# Altium schematic symbol library Robert_.SchLib: 177 symbols (part 5 of 6)
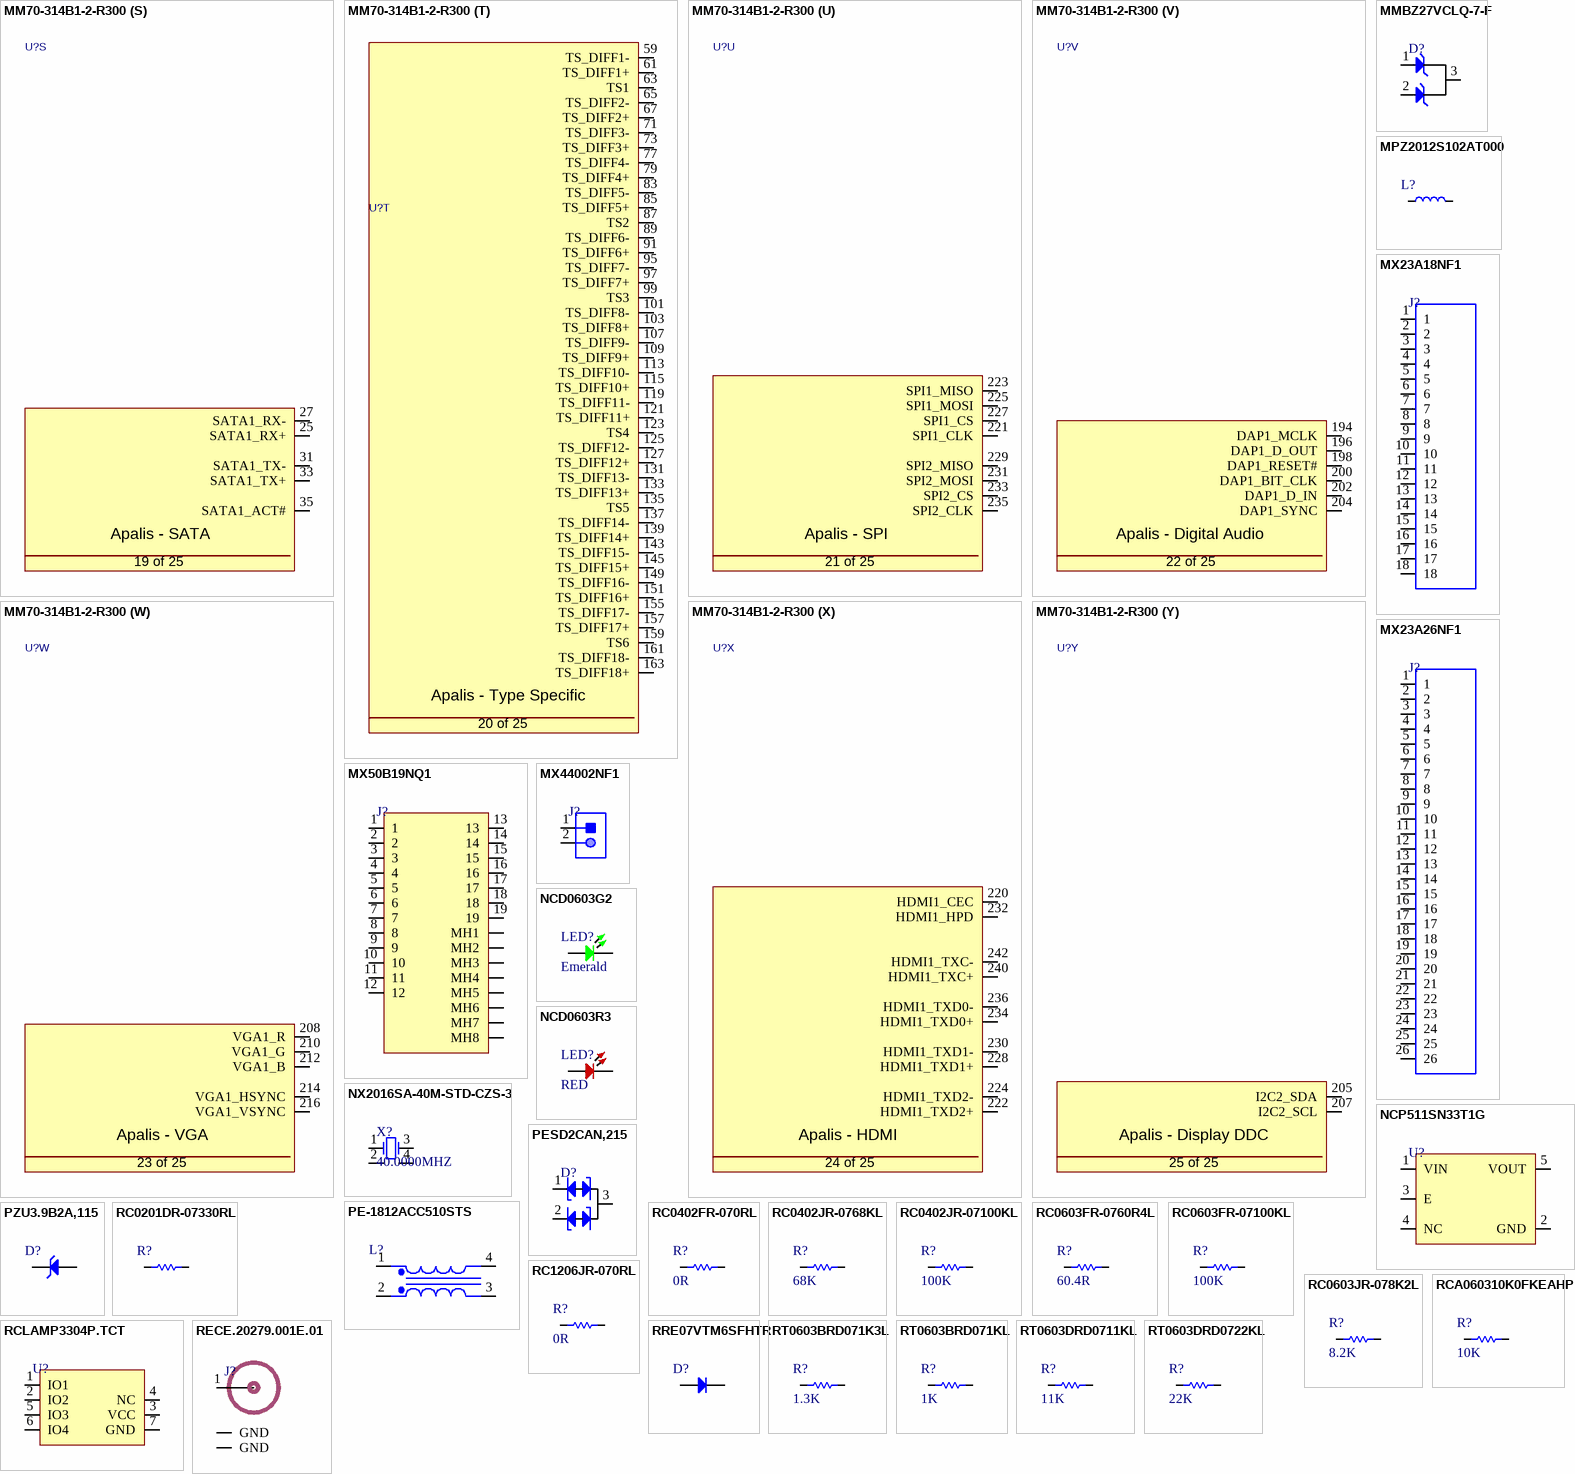
[diagram p10: symbols MM70-314B1-2-R300 to RT0603DRD0722KL]

## RC0402JR-0768KL
designator R?, comment 68K
RES 68K OHM 5% 1/16W 0402; Manufacturer: Yageo; Manufacturer Part Number: RC0402JR-0768KL; Supplier: Future Electronics; Supplier Part Number: 7241375; RoHS: Yes; Category: Chip SMD Resistors; Stock: 120000; Pricing: 10000=0.0008, 100000=0.0008, 400000=0.0008, 1250000=0.0007, 4000000=0.0007 (USD); ComponentLink1URL: https://datasheet.ciiva.com/7850/1018594-7850238.pdf?src-supplier=Element14; ComponentLink1Description: https://datasheet.ciiva.com/7850/1018594-7850238.pdf?src-supplier=Element14; ComponentLink2URL: https://datasheet.ciiva.com/7850/1018594-7850239.pdf?src-supplier=Element14; ComponentLink2Description: https://datasheet.ciiva.com/7850/1018594-7850239.pdf?src-supplier=Element14; ComponentLink3URL: https://datasheet.ciiva.com/7983/1018594-7983608.pdf?src-supplier=Element14; ComponentLink3Description: https://datasheet.ciiva.com/7983/1018594-7983608.pdf?src-supplier=Element14; ComponentLink4URL: https://datasheet.ciiva.com/2518/pyu-r-int-thick-7-2518898.pdf?src-supplier=Digi-Key; ComponentLink4Description: https://datasheet.ciiva.com/2518/pyu-r-int-thick-7-2518898.pdf?src-supplier=Digi-Key; ComponentLink5URL: https://datasheet.ciiva.com/2518/pyu-r-int-thick-7-2518899.pdf?src-supplier=Digi-Key; ComponentLink5Description: https://datasheet.ciiva.com/2518/pyu-r-int-thick-7-2518899.pdf?src-supplier=Digi-Key; ComponentLink6URL: https://datasheet.ciiva.com/2518/pyu-r-int-thick-7-2518900.pdf?src-supplier=Digi-Key; ComponentLink6Description: https://datasheet.ciiva.com/2518/pyu-r-int-thick-7-2518900.pdf?src-supplier=Digi-Key; ComponentLink7URL: https://datasheet.ciiva.com/6067/1018594-6067879.pdf?src-supplier=Farnell; ComponentLink7Description: https://datasheet.ciiva.com/6067/1018594-6067879.pdf?src-supplier=Farnell
footprint Res-0402
pins: 1, 2

## RC0402JR-07100KL
designator R?, comment 100K
RES 100K OHM 5% 1/16W 0402; Manufacturer: Yageo; Manufacturer Part Number: RC0402JR-07100KL; Voltage Rating: 50V; Value: 100kR; Power Rating: 62.5mW; Temperature Coefficient: 100ppm/°C; Max Power Dissipation: 63mW; Supplier: Future Electronics; Supplier Part Number: 4246625; RoHS: Yes; Category: Chip SMD Resistors; Stock: 7540000; Pricing: 10000=0.0013, 100000=0.0008, 200000=0.0013, 400000=0.0008, 750000=0.0012, 1250000=0.0007, 2500000=0.0012, 4000000=0.0007, 10000000=0.0011 (USD); Case/Package: 0402; Case Code (Metric): 1005; Case Code (Imperial): 0402; Min Operating Temperature: -55°C; Max Operating Temperature: 155°C; Packaging: Tape and Reel; Termination: SMD/SMT; Tolerance: 5%; Series: RC; Resistor Type: Thick Film; Number of Terminations: 2; Features: Moisture Resistant; Resistance Tolerance: 5%; Construction: Rectangular; Length: 1mm; Depth: 0.5mm; Lead Free: Lead Free; Reach SVHC Compliant: Unknown; RoHS Compliant: Yes; Military Standard: Not; ComponentLink1URL: https://datasheet.ciiva.com/2491/pyu-r-int-thick-7-2491208.pdf?src-supplier=Digi-Key; ComponentLink1Description: https://datasheet.ciiva.com/2491/pyu-r-int-thick-7-2491208.pdf?src-supplier=Digi-Key; ComponentLink2URL: https://datasheet.ciiva.com/46394/1018594-46394941.pdf?src-supplier=Element14; ComponentLink2Description: https://datasheet.ciiva.com/46394/1018594-46394941.pdf?src-supplier=Element14; ComponentLink3URL: https://datasheet.ciiva.com/2491/pyu-r-int-thick-7-2491209.pdf?src-supplier=Digi-Key; ComponentLink3Description: https://datasheet.ciiva.com/2491/pyu-r-int-thick-7-2491209.pdf?src-supplier=Digi-Key; ComponentLink4URL: https://datasheet.ciiva.com/2491/pyu-r-int-thick-7-2491207.pdf?src-supplier=Digi-Key; ComponentLink4Description: https://datasheet.ciiva.com/2491/pyu-r-int-thick-7-2491207.pdf?src-supplier=Digi-Key; ComponentLink5URL: https://datasheet.ciiva.com/12668/pyu-rc0402-51-rohs-l-6-r-12668218.pdf?src-supplier=Mouser; ComponentLink5Description: https://datasheet.ciiva.com/12668/pyu-rc0402-51-rohs-l-6-r-12668218.pdf?src-supplier=Mouser
footprint Res-0402
pins: 1, 2

## RC0603FR-0760R4L
designator R?, comment 60.4R
RES 60.4 OHM 1% 1/10W 0603; Manufacturer: Yageo; Manufacturer Part Number: RC0603FR-0760R4L; Supplier: Rs; Supplier Part Number: 2424164; RoHS: Yes; Category: Chip SMD Resistors; Stock: 8600; Pricing: 100=0.008, 1000=0.007, 2000=0.006 (GBP); ComponentLink1URL: https://datasheet.ciiva.com/12558/rc0603-272842-12558933.pdf?src-supplier=Mouser; ComponentLink1Description: https://datasheet.ciiva.com/12558/rc0603-272842-12558933.pdf?src-supplier=Mouser
footprint Res-0603
pins: 1, 2

## RC0603FR-07100KL
designator R?, comment 100K
RES 100K OHM 1% 1/10W 0603; Manufacturer: Yageo; Manufacturer Part Number: RC0603FR-07100KL; Value: 100kR; Temperature Coefficient: 100ppm/°C; Voltage Rating (DC): 50V; Power Rating: 100mW; Supplier: Future Electronics; Supplier Part Number: 3697448; RoHS: Yes; Category: Chip SMD Resistors; Stock: 11175000; Pricing: 5000=0.0013, 50000=0.0012, 75000=0.0014, 200000=0.0011, 250000=0.0014, 625000=0.0011, 750000=0.0013, 2000000=0.001, 2500000=0.0012 (USD); Case/Package: 0603; Pins: 2; Case Code (Imperial): 0603; Case Code (Metric): 1608; Min Operating Temperature: -55°C; Max Operating Temperature: 155°C; Tolerance: 1%; Resistor Type: Thick Film; Packaging: Tape and Reel; Voltage Rating: 50V; Termination: SMD/SMT; Number of Terminations: 2; Features: Moisture Resistant; Series: RC; Max Power Dissipation: 100mW; Resistance Tolerance: 1%; Construction: Rectangular; Technology: THICK FILM; Length: 1.6mm; Width: 0.8mm; Height: 0.45mm; Depth: 0.8mm; Reach SVHC Compliant: No; Lead Free: Lead Free; Military Standard: Not; RoHS Compliant: Yes
footprint Res-0603
pins: 1, 2

## RC0603JR-078K2L
designator R?, comment 8.2K
RES 8.2K OHM 5% 1/10W 0603; Manufacturer: Yageo; Manufacturer Part Number: RC0603JR-078K2L; Supplier: Future Electronics; Supplier Part Number: 5790217; RoHS: Yes; Category: Chip SMD Resistors; Stock: 755000; Pricing: 5000=0.0015, 75000=0.0015, 250000=0.0014, 750000=0.0013, 2500000=0.0012 (USD); ComponentLink1URL: https://datasheet.ciiva.com/7746/443971-7746543.pdf?src-supplier=Element14; ComponentLink1Description: https://datasheet.ciiva.com/7746/443971-7746543.pdf?src-supplier=Element14; ComponentLink2URL: https://datasheet.ciiva.com/2452/pyu-r-int-thick-7-2452914.pdf?src-supplier=Digi-Key; ComponentLink2Description: https://datasheet.ciiva.com/2452/pyu-r-int-thick-7-2452914.pdf?src-supplier=Digi-Key; ComponentLink3URL: https://datasheet.ciiva.com/2452/pyu-r-int-thick-7-2452915.pdf?src-supplier=Digi-Key; ComponentLink3Description: https://datasheet.ciiva.com/2452/pyu-r-int-thick-7-2452915.pdf?src-supplier=Digi-Key; ComponentLink4URL: https://datasheet.ciiva.com/2452/pyu-r-int-thick-7-2452916.pdf?src-supplier=Digi-Key; ComponentLink4Description: https://datasheet.ciiva.com/2452/pyu-r-int-thick-7-2452916.pdf?src-supplier=Digi-Key
footprint Res-0603
pins: 1, 2

## RC1206JR-070RL
designator R?, comment 0R
RES 0 OHM JUMPER 1/4W 1206; Manufacturer: Yageo; Manufacturer Part Number: RC1206JR-070RL; Value: 0mR; Tolerance: 5%; Power Rating: 250mW; Voltage Rating: 200V; Temperature Coefficient: 200ppm/°C; Supplier: Future Electronics; Supplier Part Number: 1070203; RoHS: Yes; Category: Chip SMD Resistors; Stock: 615000; Pricing: 5000=0.0047, 25000=0.0045, 100000=0.0042, 250000=0.0041, 625000=0.0038 (USD); Case/Package: 1206; Contact Plating: Tin,Matte; Case Code (Metric): 3216; Case Code (Imperial): 1206; Min Operating Temperature: -55°C; Max Operating Temperature: 155°C; Resistor Type: Thick Film,Carbon Film; Packaging: Tape and Reel; Package Quantity: 1; Number of Terminations: 2; Termination: SMD/SMT; Max Power Dissipation: 250mW; Series: RC; Resistance Tolerance: 5%; Technology: THICK FILM; Features: Moisture Resistant; Voltage Rating (AC): 200V; Length: 0.122inch; Width: 0.063inch; Height: 0.026inch; Depth: 1.6mm; Lead Free: Lead Free; RoHS Compliant: Yes; Reach SVHC Compliant: Unknown; ComponentLink1URL: https://datasheet.ciiva.com/11808/0900766b80c6630a-11808156.pdf?src-supplier=Rs; ComponentLink1Description: https://datasheet.ciiva.com/11808/0900766b80c6630a-11808156.pdf?src-supplier=Rs; ComponentLink2URL: https://datasheet.ciiva.com/29181/402222-da-01-en-smd-widerstand-0-ohm-1206-29181568.pdf?src-supplier=Conrad; ComponentLink2Description: https://datasheet.ciiva.com/29181/402222-da-01-en-smd-widerstand-0-ohm-1206-29181568.pdf?src-supplier=Conrad; ComponentLink3URL: https://datasheet.ciiva.com/7983/444357-7983807.pdf?src-supplier=Element14; ComponentLink3Description: https://datasheet.ciiva.com/7983/444357-7983807.pdf?src-supplier=Element14; ComponentLink4URL: https://datasheet.ciiva.com/22747/1692832-22747541.pdf?src-supplier=Element14; ComponentLink4Description: https://datasheet.ciiva.com/22747/1692832-22747541.pdf?src-supplier=Element14; ComponentLink5URL: https://datasheet.ciiva.com/46445/444357-46445719.pdf?src-supplier=Element14; ComponentLink5Description: https://datasheet.ciiva.com/46445/444357-46445719.pdf?src-supplier=Element14; ComponentLink6URL: https://datasheet.ciiva.com/2458/pyu-rc1206-51-rohs-l-4-2458669.pdf?src-supplier=Digi-Key; ComponentLink6Description: https://datasheet.ciiva.com/2458/pyu-rc1206-51-rohs-l-4-2458669.pdf?src-supplier=Digi-Key; ComponentLink7URL: https://datasheet.ciiva.com/2458/pyu-rc1206-51-rohs-l-4-2458670.pdf?src-supplier=Digi-Key; ComponentLink7Description: https://datasheet.ciiva.com/2458/pyu-rc1206-51-rohs-l-4-2458670.pdf?src-supplier=Digi-Key; ComponentLink8URL: https://datasheet.ciiva.com/2458/pyu-rc1206-51-rohs-l-4-2458668.pdf?src-supplier=Digi-Key; ComponentLink8Description: https://datasheet.ciiva.com/2458/pyu-rc1206-51-rohs-l-4-2458668.pdf?src-supplier=Digi-Key; ComponentLink9URL: https://datasheet.ciiva.com/7857/1692832-7857422.pdf?src-supplier=Element14; ComponentLink9Description: https://datasheet.ciiva.com/7857/1692832-7857422.pdf?src-supplier=Element14; ComponentLink10URL: https://datasheet.ciiva.com/7857/1692832-7857421.pdf?src-supplier=Element14; ComponentLink10Description: https://datasheet.ciiva.com/7857/1692832-7857421.pdf?src-supplier=Element14; ComponentLink11URL: https://datasheet.ciiva.com/17035/pyu-rc1206-51-rohs-l-4-17035512.pdf?src-supplier=Future+Electronics; ComponentLink11Description: https://datasheet.ciiva.com/17035/pyu-rc1206-51-rohs-l-4-17035512.pdf?src-supplier=Future+Electronics
footprint Res-1206
pins: 1, 2

## RCA060310K0FKEAHP
designator R?, comment 10K
RES SMD 10K OHM 1% 1/10W 0603; Manufacturer: Vishay Dale; Manufacturer Part Number: RCA060310K0FKEAHP; Value: 10kR; Max Power Dissipation: 250mW; Temperature Coefficient: 100ppm/°C; Supplier: Future Electronics; Supplier Part Number: 4171415; RoHS: Yes; Category: Chip SMD Resistors; Stock: 10000; Pricing: 5000=0.0413, 10000=0.0403, 15000=0.0397, 25000=0.0389, 50000=0.0374 (USD); Case/Package: 0603; Case Code (Imperial): 0603; Case Code (Metric): 1608; Min Operating Temperature: -55°C; Max Operating Temperature: 155°C; Features: Automotive AEC-Q200,Anti-Sulfur; Packaging: Cut Tape; Tolerance: 1%; Number of Terminations: 2; Series: RCA-HP; Ratings: AEC-Q200; RoHS Compliant: Yes; ComponentLink1URL: http://www.vishay.com/docs/20067/rcahp.pdf?src-supplier=Digi-Key; ComponentLink1Description: http://www.vishay.com/docs/20067/rcahp.pdf?src-supplier=Digi-Key
footprint Res-0603
pins: 1, 2

## RCLAMP3304P.TCT
designator U?
TVS DIODE 3.3VWM 16VC SLP1616P6; Manufacturer: Semtech; Manufacturer Part Number: RCLAMP3304P.TCT; Direction: Unidirectional; Value: 0.4pF; Number of Channels: 4; Number of Elements: 1; Reverse Standoff Voltage: 3.3V; Min Breakdown Voltage: 3.5V; Clamping Voltage: 16V; Peak Pulse Power: 80W; Power Line Protection: Yes; Leakage Current: 500nA; Peak Pulse Current: 5A; Supplier: Avnet; Supplier Part Number: RCLAMP3304P.TCT; RoHS: Yes; Category: TVS Diodes; Stock: 51000; Pricing: 3000=0.486 (USD); Mounting Technology: Surface Mount; Case/Package: QFN; Pins: 6; Min Operating Temperature: -55°C; Max Operating Temperature: 125°C; Packaging: Tape and Reel; Working Voltage: 3.3V; Polarity: Unidirectional; Operating Supply Voltage: 3.3V; Series: RailClamp®; Clamping Voltage-Max: 16V; Number of Unidirectional Channels: 4; Length: 1.6mm; Depth: 1.6mm; Radiation Hardening: No; Lead Free: Lead Free; RoHS Compliant: Yes; ComponentLink1URL: https://datasheet.ciiva.com/16480/rclamp2504p-tct-16480613.pdf?src-supplier=Future+Electronics; ComponentLink1Description: https://datasheet.ciiva.com/16480/rclamp2504p-tct-16480613.pdf?src-supplier=Future+Electronics; ComponentLink2URL: https://datasheet.ciiva.com/18065/getdatasheetpartid-146086-18065702.pdf?src-supplier=Verical; ComponentLink2Description: https://datasheet.ciiva.com/18065/getdatasheetpartid-146086-18065702.pdf?src-supplier=Verical; ComponentLink3URL: https://datasheet.ciiva.com/338/rclamp2504p-rclamp3304p-338729.pdf?src-supplier=Digi-Key; ComponentLink3Description: https://datasheet.ciiva.com/338/rclamp2504p-rclamp3304p-338729.pdf?src-supplier=Digi-Key; ComponentLink4URL: https://datasheet.ciiva.com/338/rclamp2504p-rclamp3304p-338730.pdf?src-supplier=Digi-Key; ComponentLink4Description: https://datasheet.ciiva.com/338/rclamp2504p-rclamp3304p-338730.pdf?src-supplier=Digi-Key; ComponentLink5URL: https://datasheet.ciiva.com/338/rclamp2504p-rclamp3304p-338728.pdf?src-supplier=Digi-Key; ComponentLink5Description: https://datasheet.ciiva.com/338/rclamp2504p-rclamp3304p-338728.pdf?src-supplier=Digi-Key; ComponentLink6URL: https://datasheet.ciiva.com/11193/rclamp2504p-rclamp3304p-11193626.pdf?src-supplier=Avnet; ComponentLink6Description: https://datasheet.ciiva.com/11193/rclamp2504p-rclamp3304p-11193626.pdf?src-supplier=Avnet
footprint SLP1616P6 (1.6x1.6)
pins: 1 IO1, 2 IO2, 3 VCC, 4 NC, 5 IO3, 6 IO4, 7 GND

## RECE.20279.001E.01
designator J?
CONN UMC RCPT STR 50 OHM SMD; Manufacturer: Taoglas; Manufacturer Part Number: RECE.20279.001E.01; Supplier: Arrow Electronics; Supplier Part Number: RECE.20279.001E.01; RoHS: Yes; Category: RF / Coaxial Connectors; Stock: 15000; Pricing: 5000=0.738 (USD); ComponentLink1URL: https://datasheet.octopart.com/RECE.20279.001E.01-Taoglas-datasheet-158528537.pdf?src-supplier=Electro+Sonic; ComponentLink1Description: https://datasheet.octopart.com/RECE.20279.001E.01-Taoglas-datasheet-158528537.pdf?src-supplier=Electro+Sonic
footprint RECE.20279.001E.01
pins: 1 RF_IN, 2 GND, 3 GND

## RRE07VTM6SFHTR
designator D?
DIODE GP 600V 700MA TUMD2SM; Manufacturer: Rohm; Manufacturer Part Number: RRE07VTM6SFHTR; Max Forward Surge Current (Ifsm): 2A; Supplier: Digi-Key; Supplier Part Number: RRE07VTM6SFHCT-ND; RoHS: Yes; Category: Rectifier Diodes; Stock: 3000; Pricing: 1=0.43, 10=0.308, 100=0.1552, 500=0.13758, 1000=0.10706 (USD); Pins: 2; Max Operating Temperature: 150°C; Max Repetitive Reverse Voltage (Vrrm): 600V; Forward Current: 700mA; Packaging: Cut Tape; Reach SVHC Compliant: No; RoHS Compliant: Yes; ComponentLink1URL: http://www.farnell.com/datasheets/2067225.pdf?src-supplier=Farnell; ComponentLink1Description: http://www.farnell.com/datasheets/2067225.pdf?src-supplier=Farnell; ComponentLink2URL: http://www.farnell.com/datasheets/2067225.pdf?src-supplier=Element14; ComponentLink2Description: http://www.farnell.com/datasheets/2067225.pdf?src-supplier=Element14
footprint TUMD2SM
pins: 1 K, 2 A

## RT0603BRD071K3L
designator R?, comment 1.3K
RES SMD 1.3K OHM 0.1% 1/10W 0603; Manufacturer: Yageo; Manufacturer Part Number: RT0603BRD071K3L; Supplier: Future Electronics; Supplier Part Number: 1104750; RoHS: Yes; Category: Chip SMD Resistors; Stock: 25000; Pricing: 5000=0.0354, 15000=0.0341, 25000=0.0335, 50000=0.0327, 100000=0.0315 (USD); ComponentLink1URL: https://datasheet.ciiva.com/8895/pyu-rt-1-to-0-05-rohs-l-4-8895677.pdf?src-supplier=Avnet; ComponentLink1Description: https://datasheet.ciiva.com/8895/pyu-rt-1-to-0-05-rohs-l-4-8895677.pdf?src-supplier=Avnet; ComponentLink2URL: https://datasheet.ciiva.com/2585/pyu-rt-1-to-0-05-rohs-l-4-2585747.pdf?src-supplier=Digi-Key; ComponentLink2Description: https://datasheet.ciiva.com/2585/pyu-rt-1-to-0-05-rohs-l-4-2585747.pdf?src-supplier=Digi-Key; ComponentLink3URL: https://datasheet.ciiva.com/46634/pyu-rt-1-to-0-05-rohs-l-5-46634957.pdf?src-supplier=Digi-Key; ComponentLink3Description: https://datasheet.ciiva.com/46634/pyu-rt-1-to-0-05-rohs-l-5-46634957.pdf?src-supplier=Digi-Key; ComponentLink4URL: https://datasheet.ciiva.com/12811/pyu-rt-1-to-0-05-rohs-l-4-12811930.pdf?src-supplier=Mouser; ComponentLink4Description: https://datasheet.ciiva.com/12811/pyu-rt-1-to-0-05-rohs-l-4-12811930.pdf?src-supplier=Mouser
footprint Res-0603
pins: 1, 2

## RT0603BRD071KL
designator R?, comment 1K
RES SMD 1K OHM 0.1% 1/10W 0603; Manufacturer: Yageo; Manufacturer Part Number: RT0603BRD071KL; Resistance: 1kR; Power Rating: 100mW; Voltage Rating: 75V; Temperature Coefficient: 25ppm/°C; Voltage Rating (DC): 50V; Item Type: Resistor; Supplier 1: Arrow Electronics; RoHS: Yes; Category: Chip SMD Resistors; Stock 1: 130000; Pricing 1: 5000=0.03900, 10000=0.03450, 25000=0.03070, 50000=0.02040 (USD); Mount: Surface Mount; Case/Package: 0603; Case Code (Metric): 1608; Case Code (Imperial): 0603; Contact Plating: Tin,Lead; Size Code: 0603; Min Operating Temperature: -55°C; Max Operating Temperature: 125°C; Package Quantity: 5000; Packaging: Tape and Reel; Resistor Type: Thin Film; Number of Terminations: 2; Termination: SMD/SMT; Max Power Dissipation: 100mW; Features: Moisture Resistant; Series: RT; Technology: THIN FILM; Construction: Rectangular; Length: 1.6mm; Width: 0.031inch; Height: 0.022inch; Depth: 0.8mm; Military Standard: Not; Lead Free: Lead Free; RoHS Compliant: Yes; ComponentLink1URL: https://datasheet.ciiva.com/11819/0900766b8079c86e-11819652.pdf?src-supplier=RSComponents; ComponentLink1Description: https://datasheet.ciiva.com/11819/0900766b8079c86e-11819652.pdf?src-supplier=RSComponents; ComponentLink2URL: https://datasheet.ciiva.com/5624/pyu-rt-1-to-0-05-rohs-l-4-5624759.pdf?src-supplier=Mouser; ComponentLink2Description: https://datasheet.ciiva.com/5624/pyu-rt-1-to-0-05-rohs-l-4-5624759.pdf?src-supplier=Mouser; ComponentLink3URL: https://datasheet.ciiva.com/29718/pyu-rt-1-to-0-05-rohs-l-4-29718010.pdf?src-supplier=Digi-Key; ComponentLink3Description: https://datasheet.ciiva.com/29718/pyu-rt-1-to-0-05-rohs-l-4-29718010.pdf?src-supplier=Digi-Key; ComponentLink4URL: https://datasheet.ciiva.com/29718/pyu-rt-1-to-0-05-rohs-l-4-29718011.pdf?src-supplier=Digi-Key; ComponentLink4Description: https://datasheet.ciiva.com/29718/pyu-rt-1-to-0-05-rohs-l-4-29718011.pdf?src-supplier=Digi-Key; Supplier Part Number 1: RT0603BRD071KL; LCSC Part Number: C110776
footprint Res-0603
pins: 1, 2

## RT0603DRD0711KL
designator R?, comment 11K
RES SMD 11K OHM 0.5% 1/10W 0603; Manufacturer: Yageo; Manufacturer Part Number: RT0603DRD0711KL; Supplier: Future Electronics; Supplier Part Number: 3061514; RoHS: Yes; Category: Chip SMD Resistors; Stock: 70000; Pricing: 5000=0.0133, 15000=0.0128, 25000=0.0126, 100000=0.012, 150000=0.0117 (USD); ComponentLink1URL: https://datasheet.ciiva.com/8891/pyu-rt-1-to-0-05-rohs-l-4-8891301.pdf?src-supplier=Avnet; ComponentLink1Description: https://datasheet.ciiva.com/8891/pyu-rt-1-to-0-05-rohs-l-4-8891301.pdf?src-supplier=Avnet
footprint Res-0603
pins: 1, 2

## RT0603DRD0722KL
designator R?, comment 22K
RES SMD 22K OHM 0.5% 1/10W 0603; Manufacturer: Yageo; Manufacturer Part Number: RT0603DRD0722KL; Supplier: Future Electronics; Supplier Part Number: 7093543; RoHS: Yes; Category: Chip SMD Resistors; Stock: 5000; Pricing: 5000=0.0133, 15000=0.0128, 25000=0.0126, 100000=0.012, 150000=0.0117 (USD); ComponentLink1URL: https://datasheet.ciiva.com/12810/pyu-rt-1-to-0-05-rohs-l-4-12810773.pdf?src-supplier=Mouser; ComponentLink1Description: https://datasheet.ciiva.com/12810/pyu-rt-1-to-0-05-rohs-l-4-12810773.pdf?src-supplier=Mouser
footprint Res-0603
pins: 1, 2

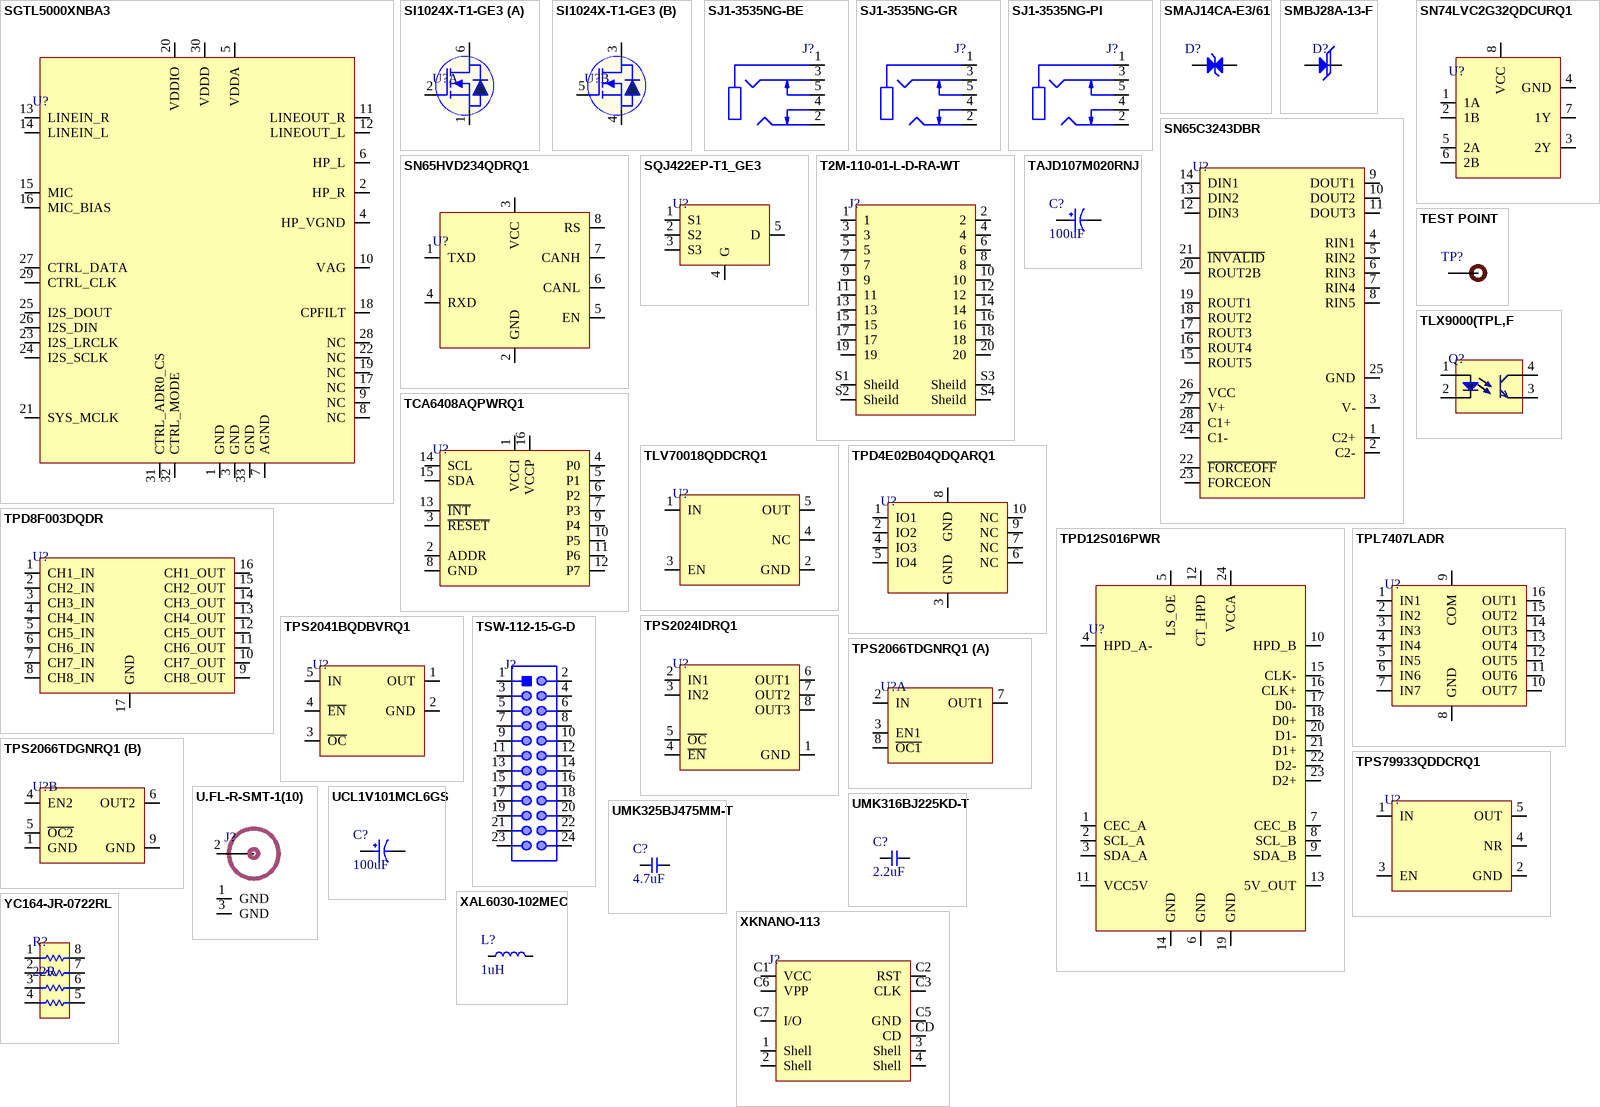
[diagram p6: symbols SGTL5000XNBA3 to YC164-JR-0722RL]

## SGTL5000XNBA3
designator U?
IC Audio Codec Stereo 32HVQFN; Manufacturer: NXP Semiconductors; Manufacturer Part Number: SGTL5000XNBA3; Supplier: Arrow Electronics; Supplier Part Number: SGTL5000XNBA3; RoHS: No; Category: CODECs; Stock: 327; Pricing: 1=7.3439, 10=6.7746, 25=6.3951, 50=6.0651, 100=5.8558, 500=5.7523 (USD); Item Type: *
footprint 32-QFN (32pins, 5x5mm body, 0.5mm pitch QFN package)
pins: 1 GND, 2 HP_R, 3 GND, 4 HP_VGND, 5 VDDA, 6 HP_L, 7 AGND, 8 NC, 9 NC, 10 VAG, 11 LINEOUT_R, 12 LINEOUT_L, 13 LINEIN_R, 14 LINEIN_L, 15 MIC, 16 MIC_BIAS, 17 NC, 18 CPFILT, 19 NC, 20 VDDIO, 21 SYS_MCLK, 22 NC, 23 I2S_LRCLK, 24 I2S_SCLK, 25 I2S_DOUT, 26 I2S_DIN, 27 CTRL_DATA, 28 NC, 29 CTRL_CLK, 30 VDDD, 31 CTRL_ADR0_CS, 32 CTRL_MODE, 33 GND

## SI1024X-T1-GE3
designator U?
MOSFET 2N-CH 20V 0.485A SC89-6; Manufacturer: Vishay Siliconix; Manufacturer Part Number: SI1024X-T1-GE3; Supplier: Mouser; Supplier Part Number: 781-SI1024X-T1-GE3; RoHS: Yes; Category: MOSFETs; Stock: 297800; Pricing: 1=0.52, 10=0.442, 50=0.442, 100=0.333, 1000=0.206, 10000=0.163 (USD); ComponentLink1URL: https://datasheet.ciiva.com/1253/71170-1253313.pdf?src-supplier=Newark; ComponentLink1Description: https://datasheet.ciiva.com/1253/71170-1253313.pdf?src-supplier=Newark; ComponentLink2URL: https://datasheet.ciiva.com/6388/71170-6388105.pdf?src-supplier=Digi-Key; ComponentLink2Description: https://datasheet.ciiva.com/6388/71170-6388105.pdf?src-supplier=Digi-Key; ComponentLink3URL: https://datasheet.ciiva.com/6388/71170-6388154.pdf?src-supplier=Digi-Key; ComponentLink3Description: https://datasheet.ciiva.com/6388/71170-6388154.pdf?src-supplier=Digi-Key; ComponentLink4URL: https://datasheet.ciiva.com/6388/71170-6388155.pdf?src-supplier=Digi-Key; ComponentLink4Description: https://datasheet.ciiva.com/6388/71170-6388155.pdf?src-supplier=Digi-Key; ComponentLink5URL: https://datasheet.ciiva.com/11161/71170-11161434.pdf?src-supplier=Avnet; ComponentLink5Description: https://datasheet.ciiva.com/11161/71170-11161434.pdf?src-supplier=Avnet
footprint SC-89
part A pins: 1 S1, 2 G1, 6 D1
part B pins: 3 D2, 4 S2, 5 G2

## SJ1-3535NG-BE
designator J?
CONN JACK STEREO 3.5MM R/A Blue; Manufacturer: CUI; Manufacturer Part Number: SJ1-3535NG-BE; Gender: Female; Shielding: Unshielded; Current Rating: 1A; Number of Conductors: 3; Number of Ports: 1; Supplier: Future Electronics; Supplier Part Number: 4086811; RoHS: Yes; Category: Uncategorized; Mounting Technology: Through Hole; Color: Blue; Contact Plating: Tin; Orientation: Horizontal; Packaging: Bulk; Connector Type: Jack; Termination: Solder; Lead Free: Lead Free; ComponentLink1URL: https://www.cui.com/product/resource/digikeypdf/sj1-353xng.pdf?src-supplier=Digi-Key; ComponentLink1Description: https://www.cui.com/product/resource/digikeypdf/sj1-353xng.pdf?src-supplier=Digi-Key
footprint SJ1-3535NG-BE
pins: 1, 2, 3, 4, 5

## SJ1-3535NG-GR
designator J?
CONN JACK STEREO 3.5MM R/A Green; Manufacturer: CUI; Manufacturer Part Number: SJ1-3535NG-GR; Gender: Female; Shielding: Unshielded; Current Rating: 1A; Number of Conductors: 3; Number of Ports: 1; Supplier: Mouser; Supplier Part Number: 490-SJ1-3535NG-GR; RoHS: No; Category: Uncategorized; Mounting Technology: Through Hole; Contact Plating: Tin; Color: Green; Body Color: Green; Packaging: Bulk; Termination: Solder; Orientation: Horizontal; Connector Type: Jack; Series: SJ1; Lead Free: Lead Free; RoHS Compliant: No; ComponentLink1URL: https://www.cui.com/product/resource/digikeypdf/sj1-353xng.pdf?src-supplier=Digi-Key; ComponentLink1Description: https://www.cui.com/product/resource/digikeypdf/sj1-353xng.pdf?src-supplier=Digi-Key
footprint SJ1-3535NG-GR
pins: 1, 2, 3, 4, 5

## SJ1-3535NG-PI
designator J?
CONN JACK STEREO 3.5MM R/A Pink; Manufacturer: CUI; Manufacturer Part Number: SJ1-3535NG-PI; Gender: Female; Shielding: Unshielded; Current Rating: 1A; Number of Conductors: 3; Number of Ports: 1; Supplier: Mouser; Supplier Part Number: 490-SJ1-3535NG-PI; RoHS: No; Category: Uncategorized; Mounting Technology: Through Hole; Contact Plating: Tin; Color: Pink; Body Color: Pink; Packaging: Bulk; Termination: Solder; Orientation: Horizontal; Connector Type: Jack; Series: SJ1; Lead Free: Lead Free; RoHS Compliant: No; ComponentLink1URL: https://www.cui.com/product/resource/digikeypdf/sj1-353xng.pdf?src-supplier=Digi-Key; ComponentLink1Description: https://www.cui.com/product/resource/digikeypdf/sj1-353xng.pdf?src-supplier=Digi-Key
footprint SJ1-3535NG-PI
pins: 1, 2, 3, 4, 5

## SMAJ14CA-E3/61
designator D?
TVS DIODE 14VWM 23.2VC DO214AC; Manufacturer: Vishay Semiconductors; Manufacturer Part Number: SMAJ14CA-E3/61; Supplier: Mouser; Supplier Part Number: 625-SMAJ14CA-E3; RoHS: Yes; Category: TVS Diodes; Stock: 15510; Pricing: 1=0.48, 10=0.36, 50=0.36, 100=0.221, 1000=0.127, 10000=0.099 (USD); ComponentLink1URL: https://datasheet.ciiva.com/4515/smaj50a-241759-4515304.pdf?src-supplier=Mouser; ComponentLink1Description: https://datasheet.ciiva.com/4515/smaj50a-241759-4515304.pdf?src-supplier=Mouser; ComponentLink2URL: https://datasheet.ciiva.com/16382/smaj50a-16382075.pdf?src-supplier=Future+Electronics; ComponentLink2Description: https://datasheet.ciiva.com/16382/smaj50a-16382075.pdf?src-supplier=Future+Electronics
footprint SMA
pins: 1 A, 2 A

## SMBJ28A-13-F
designator D?
TVS DIODE 28VWM 45.4VC SMB; Manufacturer: Diodes; Manufacturer Part Number: SMBJ28A-13-F; Supplier: Future Electronics; Supplier Part Number: 4657243; RoHS: Yes; Category: TVS Diodes; Stock: 111; Pricing: 1=0.37, 15=0.295, 75=0.25, 300=0.215, 1500=0.169 (USD); ComponentLink1URL: https://datasheet.ciiva.com/26912/getdatasheetpartid-234000-26912533.pdf?src-supplier=Verical; ComponentLink1Description: https://datasheet.ciiva.com/26912/getdatasheetpartid-234000-26912533.pdf?src-supplier=Verical; ComponentLink2URL: https://datasheet.ciiva.com/16387/ds19002-16387564.pdf?src-supplier=Future+Electronics; ComponentLink2Description: https://datasheet.ciiva.com/16387/ds19002-16387564.pdf?src-supplier=Future+Electronics
footprint SMB_
pins: 1 A, 2 K

## SN65C3243DBR
designator U?
IC TRANSCEIVER FULL 3/5 28SSOP; Manufacturer: Texas Instruments; Manufacturer Part Number: SN65C3243DBR; Direction: Unidirectional; Value: 0.4pF; Number of Channels: 4; Number of Elements: 1; Reverse Standoff Voltage: 3.3V; Min Breakdown Voltage: 3.5V; Clamping Voltage: 16V; Peak Pulse Power: 80W; Power Line Protection: Yes; Leakage Current: 500nA; Peak Pulse Current: 5A; Supplier: Mouser; Supplier Part Number: 595-SN65C3243DBR; RoHS: Yes; Category: Interface ICs; Stock: 5977; Pricing: 1=3.6, 10=3.17, 50=3.17, 100=2.65, 1000=1.9, 10000=1.71 (USD); ComponentLink1URL: https://datasheet.ciiva.com/41461/001186900-da-01-en-ic-line-drvr-rc-sn65c3243dbr-ssop-28-tid-41461426.pdf?src-supplier=Conrad; ComponentLink1Description: https://datasheet.ciiva.com/41461/001186900-da-01-en-ic-line-drvr-rc-sn65c3243dbr-ssop-28-tid-41461426.pdf?src-supplier=Conrad; ComponentLink2URL: https://datasheet.ciiva.com/15151/getdatasheetpartid-129898-15151437.pdf?src-supplier=Verical; ComponentLink2Description: https://datasheet.ciiva.com/15151/getdatasheetpartid-129898-15151437.pdf?src-supplier=Verical; ComponentLink3URL: https://datasheet.ciiva.com/1704/sn65c3243-1704841.pdf?src-supplier=Digi-Key; ComponentLink3Description: https://datasheet.ciiva.com/1704/sn65c3243-1704841.pdf?src-supplier=Digi-Key; ComponentLink4URL: https://datasheet.ciiva.com/1704/sn65c3243-1704842.pdf?src-supplier=Digi-Key; ComponentLink4Description: https://datasheet.ciiva.com/1704/sn65c3243-1704842.pdf?src-supplier=Digi-Key; ComponentLink5URL: https://datasheet.ciiva.com/1704/sn65c3243-1704843.pdf?src-supplier=Digi-Key; ComponentLink5Description: https://datasheet.ciiva.com/1704/sn65c3243-1704843.pdf?src-supplier=Digi-Key; Mounting Technology: Surface Mount; Case/Package: QFN; Pins: 6; Min Operating Temperature: -55°C; Max Operating Temperature: 125°C; Packaging: Tape and Reel; Working Voltage: 3.3V; Polarity: Unidirectional; Operating Supply Voltage: 3.3V; Series: RailClamp®; Clamping Voltage-Max: 16V; Number of Unidirectional Channels: 4; Length: 1.6mm; Depth: 1.6mm; Radiation Hardening: No; Lead Free: Lead Free; RoHS Compliant: Yes; ComponentLink6URL: https://datasheet.ciiva.com/16480/rclamp2504p-tct-16480613.pdf?src-supplier=Future+Electronics; ComponentLink6Description: https://datasheet.ciiva.com/16480/rclamp2504p-tct-16480613.pdf?src-supplier=Future+Electronics; ComponentLink7URL: https://datasheet.ciiva.com/18065/getdatasheetpartid-146086-18065702.pdf?src-supplier=Verical; ComponentLink7Description: https://datasheet.ciiva.com/18065/getdatasheetpartid-146086-18065702.pdf?src-supplier=Verical; ComponentLink8URL: https://datasheet.ciiva.com/338/rclamp2504p-rclamp3304p-338729.pdf?src-supplier=Digi-Key; ComponentLink8Description: https://datasheet.ciiva.com/338/rclamp2504p-rclamp3304p-338729.pdf?src-supplier=Digi-Key; ComponentLink9URL: https://datasheet.ciiva.com/338/rclamp2504p-rclamp3304p-338730.pdf?src-supplier=Digi-Key; ComponentLink9Description: https://datasheet.ciiva.com/338/rclamp2504p-rclamp3304p-338730.pdf?src-supplier=Digi-Key; ComponentLink10URL: https://datasheet.ciiva.com/338/rclamp2504p-rclamp3304p-338728.pdf?src-supplier=Digi-Key; ComponentLink10Description: https://datasheet.ciiva.com/338/rclamp2504p-rclamp3304p-338728.pdf?src-supplier=Digi-Key; ComponentLink11URL: https://datasheet.ciiva.com/11193/rclamp2504p-rclamp3304p-11193626.pdf?src-supplier=Avnet; ComponentLink11Description: https://datasheet.ciiva.com/11193/rclamp2504p-rclamp3304p-11193626.pdf?src-supplier=Avnet
footprint SSOP-28-208mil
pins: 1 C2+, 2 C2-, 3 V-, 4 RIN1, 5 RIN2, 6 RIN3, 7 RIN4, 8 RIN5, 9 DOUT1, 10 DOUT2, 11 DOUT3, 12 DIN3, 13 DIN2, 14 DIN1, 15 ROUT5, 16 ROUT4, 17 ROUT3, 18 ROUT2, 19 ROUT1, 20 ROUT2B, 21 ~{INVALID}, 22 ~{FORCEOFF}, 23 FORCEON, 24 C1-, 25 GND, 26 VCC, 27 V+, 28 C1+

## SN65HVD234QDRQ1
designator U?
IC TRANSCEIVER HALF 1/1 8SOIC; Manufacturer: Texas Instruments; Manufacturer Part Number: SN65HVD234QDRQ1; Supplier: Digi-Key; Supplier Part Number: 296-44804-1-ND; RoHS: Yes; Category: Interface ICs; Pricing: 1=3.57, 10=3.209, 25=3.0336, 100=2.6293, 250=2.49444, 500=2.23826, 1000=1.88769 (USD); ComponentLink1URL: http://www.ti.com/general/docs/suppproductinfo.tsp?distId=10&amp;gotoUrl=http%3A%2F%2Fwww.ti.com%2Flit%2Fgpn%2Fsn65hvd234-q1&src-supplier=Digi-Key; ComponentLink1Description: http://www.ti.com/general/docs/suppproductinfo.tsp?distId=10&amp;gotoUrl=http%3A%2F%2Fwww.ti.com%2Flit%2Fgpn%2Fsn65hvd234-q1&src-supplier=Digi-Key; ComponentLink2URL: http://www.ti.com/general/docs/lit/getliterature.tsp?genericPartNumber=SN65HVD234-Q1&fileType=pdf&src-supplier=Farnell; ComponentLink2Description: http://www.ti.com/general/docs/lit/getliterature.tsp?genericPartNumber=SN65HVD234-Q1&fileType=pdf&src-supplier=Farnell; ComponentLink3URL: http://www.ti.com/lit/ds/symlink/sn65hvd234-q1.pdf?src-supplier=Digi-Key; ComponentLink3Description: http://www.ti.com/lit/ds/symlink/sn65hvd234-q1.pdf?src-supplier=Digi-Key
footprint SOIC-8
pins: 1 TXD, 2 GND, 3 VCC, 4 RXD, 5 EN, 6 CANL, 7 CANH, 8 RS

## SN74LVC2G32QDCURQ1
designator U?
IC GATE OR 2CH 2-INP 8VSSOP; Manufacturer: Texas Instruments; Manufacturer Part Number: SN74LVC2G32QDCURQ1; Supplier: Mouser; Supplier Part Number: 595-74LVC2G32QDCURQ1; RoHS: Yes; Category: Logic Gates; Stock: 7957; Pricing: 1=0.8, 10=0.665, 50=0.665, 100=0.505, 1000=0.343, 10000=0.275 (USD); ComponentLink1URL: https://datasheet.ciiva.com/12072/sn74lvc2g32-q1-213877-12072967.pdf?src-supplier=Mouser; ComponentLink1Description: https://datasheet.ciiva.com/12072/sn74lvc2g32-q1-213877-12072967.pdf?src-supplier=Mouser; ComponentLink2URL: https://datasheet.ciiva.com/6619/sn74lvc2g32-q1-6619488.pdf?src-supplier=Digi-Key; ComponentLink2Description: https://datasheet.ciiva.com/6619/sn74lvc2g32-q1-6619488.pdf?src-supplier=Digi-Key; ComponentLink3URL: https://datasheet.ciiva.com/14311/sn74lvc2g32-q1-14311324.pdf?src-supplier=Avnet; ComponentLink3Description: https://datasheet.ciiva.com/14311/sn74lvc2g32-q1-14311324.pdf?src-supplier=Avnet; ComponentLink4URL: https://datasheet.ciiva.com/6619/sn74lvc2g32-q1-6619483.pdf?src-supplier=Digi-Key; ComponentLink4Description: https://datasheet.ciiva.com/6619/sn74lvc2g32-q1-6619483.pdf?src-supplier=Digi-Key; ComponentLink5URL: https://datasheet.ciiva.com/6619/sn74lvc2g32-q1-6619485.pdf?src-supplier=Digi-Key; ComponentLink5Description: https://datasheet.ciiva.com/6619/sn74lvc2g32-q1-6619485.pdf?src-supplier=Digi-Key
footprint 8-VSSOP
pins: 1 1A, 2 1B, 3 2Y, 4 GND, 5 2A, 6 2B, 7 1Y, 8 VCC

## SQJ422EP-T1_GE3
designator U?
MOSFET N-CH 40V 74A PPAK SO-8; Manufacturer: Vishay; Manufacturer Part Number: SQJ422EP-T1_GE3; Supplier: Mouser; Supplier Part Number: 781-SQJ422EP-T1_GE3; RoHS: Yes; Category: MOSFETs; Stock: 26296; Pricing: 1=1.62, 10=1.43, 50=1.43, 100=1.18, 1000=0.798, 10000=0.714 (USD); ComponentLink1URL: https://datasheet.ciiva.com/28599/1760635-28599505.pdf?src-supplier=Element14; ComponentLink1Description: https://datasheet.ciiva.com/28599/1760635-28599505.pdf?src-supplier=Element14; ComponentLink2URL: https://datasheet.ciiva.com/29745/sqj422ep-29745736.pdf?src-supplier=Digi-Key; ComponentLink2Description: https://datasheet.ciiva.com/29745/sqj422ep-29745736.pdf?src-supplier=Digi-Key
footprint PowerPAK® SO-8
pins: 1 S1, 2 S2, 3 S3, 4 G, 5 D

## T2M-110-01-L-D-RA-WT
designator J?
CONN HEADER R/A 20POS 2MM; Manufacturer: Samtec; Manufacturer Part Number: T2M-110-01-L-D-RA-WT; Supplier: Rs; Supplier Part Number: 1801654; RoHS: Yes; Category: Connectors; Stock: 78; Pricing: 1=6.54, 25=5.74, 100=5.32, 250=5, 500=4.68 (GBP); ComponentLink1URL: http://www.farnell.com/datasheets/2607189.pdf?src-supplier=Farnell; ComponentLink1Description: http://www.farnell.com/datasheets/2607189.pdf?src-supplier=Farnell; ComponentLink2URL: http://suddendocs.samtec.com/catalog_english/t2m.pdf?src-supplier=Digi-Key; ComponentLink2Description: http://suddendocs.samtec.com/catalog_english/t2m.pdf?src-supplier=Digi-Key; ComponentLink3URL: http://cloud.samtec.com/catalog_english/t2m.pdf?src-supplier=Avnet; ComponentLink3Description: http://cloud.samtec.com/catalog_english/t2m.pdf?src-supplier=Avnet; ComponentLink4URL: http://www.farnell.com/datasheets/2607189.pdf?src-supplier=Element14; ComponentLink4Description: http://www.farnell.com/datasheets/2607189.pdf?src-supplier=Element14; ComponentLink5URL: http://www.farnell.com/datasheets/2607189.pdf?src-supplier=Newark; ComponentLink5Description: http://www.farnell.com/datasheets/2607189.pdf?src-supplier=Newark; ComponentLink6URL: https://datasheet.octopart.com/T2M-110-01-L-D-RA-WT-Samtec-datasheet-21558229.pdf?src-supplier=Newark; ComponentLink6Description: https://datasheet.octopart.com/T2M-110-01-L-D-RA-WT-Samtec-datasheet-21558229.pdf?src-supplier=Newark; ComponentLink7URL: https://datasheet.octopart.com/T2M-110-01-L-D-RA-WT-Samtec-datasheet-151555665.pdf?src-supplier=Sager+Electronics; ComponentLink7Description: https://datasheet.octopart.com/T2M-110-01-L-D-RA-WT-Samtec-datasheet-151555665.pdf?src-supplier=Sager+Electronics; ComponentLink8URL: https://datasheet.octopart.com/T2M-110-01-L-D-RA-WT-Samtec-datasheet-118493425.pdf?src-supplier=Electro+Sonic; ComponentLink8Description: https://datasheet.octopart.com/T2M-110-01-L-D-RA-WT-Samtec-datasheet-118493425.pdf?src-supplier=Electro+Sonic; ComponentLink9URL: https://datasheet.octopart.com/T2M-110-01-L-D-RA-WT-Samtec-datasheet-97293741.pdf?src-supplier=Master+Electronics; ComponentLink9Description: https://datasheet.octopart.com/T2M-110-01-L-D-RA-WT-Samtec-datasheet-97293741.pdf?src-supplier=Master+Electronics; ComponentLink10URL: https://datasheet.octopart.com/T2M-110-01-L-D-RA-WT-Samtec-datasheet-116536274.pdf?src-supplier=Toby+Electronics; ComponentLink10Description: https://datasheet.octopart.com/T2M-110-01-L-D-RA-WT-Samtec-datasheet-116536274.pdf?src-supplier=Toby+Electronics
footprint T2M-110-01-L-D-RA-WT
pins: 1, 2, 3, 4, 5, 6, 7, 8, 9, 10, 11, 12, 13, 14, 15, 16, 17, 18, 19, 20, S1 Sheild, S2 Sheild, S3 Sheild, S4 Sheild

## TAJD107M020RNJ
designator C?, comment 100uF
Cap Tant Solid 100uF 20V D CASE 20% (7.3 X 4.3 X 2.9mm) Inward L SMD 7343-31 0.5 Ohm 125C T/R; Manufacturer: Kyocera AVX; Manufacturer Part Number: TAJD107M020RNJ; Life (Hours): 2000Hour; Ripple Current: 548mA; Supplier: Digi-Key; Supplier Part Number: 478-8907-1-ND; RoHS: Yes; Category: Tantalum Capacitors; Stock: 1507; Pricing: 1=1.27, 10=1.006, 50=0.8716, 100=0.7542 (USD); ComponentLink1URL: https://datasheet.ciiva.com/29503/taj-29503388.pdf?src-supplier=Digi-Key; ComponentLink1Description: https://datasheet.ciiva.com/29503/taj-29503388.pdf?src-supplier=Digi-Key; ComponentLink2URL: https://datasheet.ciiva.com/29503/taj-29503389.pdf?src-supplier=Digi-Key; ComponentLink2Description: https://datasheet.ciiva.com/29503/taj-29503389.pdf?src-supplier=Digi-Key; ComponentLink3URL: https://datasheet.ciiva.com/29503/taj-29503390.pdf?src-supplier=Digi-Key; ComponentLink3Description: https://datasheet.ciiva.com/29503/taj-29503390.pdf?src-supplier=Digi-Key; ComponentLink4URL: https://datasheet.ciiva.com/12886/taj-27497-12886634.pdf?src-supplier=Mouser; ComponentLink4Description: https://datasheet.ciiva.com/12886/taj-27497-12886634.pdf?src-supplier=Mouser; ComponentLink5URL: https://datasheet.ciiva.com/11229/taj-11229143.pdf?src-supplier=Avnet; ComponentLink5Description: https://datasheet.ciiva.com/11229/taj-11229143.pdf?src-supplier=Avnet
footprint CAP-2917
pins: 1, 2

## TCA6408AQPWRQ1
designator U?
IC XPND 400KHZ I2C SMBUS 16TSSOP; Manufacturer: Texas Instruments; Manufacturer Part Number: TCA6408AQPWRQ1; Supplier: Mouser; Supplier Part Number: 595-TCA6408AQPWRQ1; RoHS: Yes; Category: Interface ICs; Stock: 12699; Pricing: 1=1.39, 10=1.22, 50=1.22, 100=0.997, 1000=0.748, 10000=0.643 (USD); ComponentLink1URL: http://www.ti.com/general/docs/suppproductinfo.tsp?distId=10&amp;gotoUrl=http%3A%2F%2Fwww.ti.com%2Flit%2Fgpn%2Ftca6408a-q1&src-supplier=Digi-Key; ComponentLink1Description: http://www.ti.com/general/docs/suppproductinfo.tsp?distId=10&amp;gotoUrl=http%3A%2F%2Fwww.ti.com%2Flit%2Fgpn%2Ftca6408a-q1&src-supplier=Digi-Key; ComponentLink2URL: http://www.ti.com/lit/ds/symlink/tca6408a-q1.pdf?src-supplier=Digi-Key; ComponentLink2Description: http://www.ti.com/lit/ds/symlink/tca6408a-q1.pdf?src-supplier=Digi-Key
footprint TSSOP_16
pins: 1 VCCI, 2 ADDR , 3 ~{RESET}, 4 P0, 5 P1, 6 P2, 7 P3, 8 GND, 9 P4, 10 P5, 11 P6, 12 P7, 13 ~{INT}, 14 SCL, 15 SDA, 16 VCCP

## TEST POINT
designator TP?
Test Point ON; Item Type: TEST POINT
footprint Test-point
pins: 1

## TLV70018QDDCRQ1
designator U?
IC REG LINEAR 1.8V 300MA SOT23-5; Manufacturer: Texas Instruments; Manufacturer Part Number: TLV70018QDDCRQ1; Max Power Dissipation: 500mW; Number of Outputs: 1; Max Output current: 200mA; Max Supply Voltage: 5.5V; Min Input Voltage: 2V; Min Current Limit: 320mA; Polarity: Positive; Accuracy: 2%; Quiescent Current: 30uA; Output Type: Fixed; Max Supply Current: 270uA; Power Supply Rejection Ratio (PSRR): 68dB; Supplier: Mouser; Supplier Part Number: 595-TLV70018QDDCRQ1; RoHS: Yes; Category: Voltage Regulators - Linear; Stock: 9892; Pricing: 1=0.83, 10=0.689, 50=0.689, 100=0.523, 1000=0.356, 10000=0.294 (USD); Case/Package: SOT-23-5; Pins: 5; Min Operating Temperature: -40°C; Max Operating Temperature: 125°C; Packaging: Tape and Reel; Package Quantity: 3000; Output Voltage: 1.8V; Output Current: 300mA; Number of Regulators: 1; Max Output Voltage: 1.8V; Min Output Voltage: 1.8V; Series: Automotive, AEC-Q100; Output Configuration: Positive; Lead Free: Lead Free; RoHS Compliant: Yes; ComponentLink1URL: https://datasheet.ciiva.com/29568/tlv7001x-q1-29568384.pdf?src-supplier=Digi-Key; ComponentLink1Description: https://datasheet.ciiva.com/29568/tlv7001x-q1-29568384.pdf?src-supplier=Digi-Key
footprint SOT-23-5
pins: 1 IN, 2 GND, 3 EN, 4 NC, 5 OUT

## TLX9000(TPL,F
designator Q?
TR COUPLER; SO4; AECQ; ROHS; T&R; Manufacturer: Toshiba; Manufacturer Part Number: TLX9000(TPL,F; Supplier: Digi-Key; Supplier Part Number: 264-TLX9000(TPLFDKR-ND; RoHS: No; Category: Optocouplers; Pricing: 1=3.15, 10=2.227, 100=1.8241, 500=1.53772, 1000=1.41046 (USD)
footprint 4-SOIC (0.179", 4.55mm Width)
pins: 1 An, 2 Ca, 3 E, 4 C

## TPD4E02B04QDQARQ1
designator U?
TVS DIODE 3.6VWM 8.8VC 10USON; Manufacturer: Texas Instruments; Manufacturer Part Number: TPD4E02B04QDQARQ1; Interface: LVDS,USB,Ethernet,HDMI; Number of Channels: 4; Reverse Standoff Voltage: 3.6V; Min Breakdown Voltage: 5.5V; Peak Pulse Current: 2A; Peak Pulse Power: 17W; Power Line Protection: No; Diode Type: ZENER; Supplier: Mouser; Supplier Part Number: 595-D4E02B04QDQARQ1; RoHS: Yes; Category: Integrated Circuits (ICs); Stock: 35915; Pricing: 1=0.63, 10=0.544, 50=0.544, 100=0.383, 1000=0.27, 10000=0.227 (USD); Mounting Technology: Surface Mount; Pins: 10; Min Operating Temperature: -40°C; Max Operating Temperature: 125°C; Packaging: Cut Tape; Number of Bidirectional Channels: 4; Series: Automotive, AEC-Q101; RoHS Compliant: Yes; ComponentLink1URL: http://www.ti.com/lit/ds/symlink/tpd4e02b04-q1.pdf?src-supplier=Digi-Key; ComponentLink1Description: http://www.ti.com/lit/ds/symlink/tpd4e02b04-q1.pdf?src-supplier=Digi-Key
footprint 10-USON (2.5x1)
pins: 1 IO1, 2 IO2, 3 GND, 4 IO3, 5 IO4, 6 NC, 7 NC, 8 GND, 9 NC, 10 NC

## TPD8F003DQDR
designator U?
FILTER RC(PI) 100 OHM/8.5PF SMD; Manufacturer: Texas Instruments; Manufacturer Part Number: TPD8F003DQDR; Supplier: Mouser; Supplier Part Number: 595-TPD8F003DQDR; RoHS: Yes; Category: Integrated Circuits (ICs); Stock: 28808; Pricing: 1=0.75, 10=0.534, 50=0.534, 100=0.461, 1000=0.388, 10000=0.386 (USD); ComponentLink1URL: https://datasheet.ciiva.com/6211/tpd6f003-6211216.pdf?src-supplier=Digi-Key; ComponentLink1Description: https://datasheet.ciiva.com/6211/tpd6f003-6211216.pdf?src-supplier=Digi-Key; ComponentLink2URL: https://datasheet.ciiva.com/3068/tpd6f003-3068113.pdf?src-supplier=Avnet; ComponentLink2Description: https://datasheet.ciiva.com/3068/tpd6f003-3068113.pdf?src-supplier=Avnet; ComponentLink3URL: https://datasheet.ciiva.com/6211/tpd6f003-6211213.pdf?src-supplier=Digi-Key; ComponentLink3Description: https://datasheet.ciiva.com/6211/tpd6f003-6211213.pdf?src-supplier=Digi-Key; ComponentLink4URL: https://datasheet.ciiva.com/7990/1857446-7990860.pdf?src-supplier=Element14; ComponentLink4Description: https://datasheet.ciiva.com/7990/1857446-7990860.pdf?src-supplier=Element14
footprint 16-WFDFN
pins: 1 CH1_IN, 2 CH2_IN, 3 CH3_IN, 4 CH4_IN, 5 CH5_IN, 6 CH6_IN, 7 CH7_IN, 8 CH8_IN, 9 CH8_OUT, 10 CH7_OUT, 11 CH6_OUT, 12 CH5_OUT, 13 CH4_OUT, 14 CH3_OUT, 15 CH2_OUT, 16 CH1_OUT, 17 GND

## TPD12S016PWR
designator U?
IC INTERFACE SPECIALIZED 24TSSOP; Manufacturer: Texas Instruments; Manufacturer Part Number: TPD12S016PWR; Supplier: Mouser; Supplier Part Number: 595-TPD12S016PWR; RoHS: Yes; Category: Interface ICs; Stock: 8312; Pricing: 1=1.23, 10=1.11, 50=1.05, 100=0.863, 1000=0.563, 10000=0.495 (USD); ComponentLink1URL: https://datasheet.ciiva.com/1784/tpd12s016-1784288.pdf?src-supplier=Digi-Key; ComponentLink1Description: https://datasheet.ciiva.com/1784/tpd12s016-1784288.pdf?src-supplier=Digi-Key; ComponentLink2URL: https://datasheet.ciiva.com/1495/1506096-1495817.pdf?src-supplier=Element14; ComponentLink2Description: https://datasheet.ciiva.com/1495/1506096-1495817.pdf?src-supplier=Element14; ComponentLink3URL: https://datasheet.ciiva.com/26911/getdatasheetpartid-349978-26911477.pdf?src-supplier=Verical; ComponentLink3Description: https://datasheet.ciiva.com/26911/getdatasheetpartid-349978-26911477.pdf?src-supplier=Verical; ComponentLink4URL: https://datasheet.ciiva.com/41460/001188042-da-01-en-ic-hdmi-esd-pr-tpd12s016pwr-tssop-24-tid-41460279.pdf?src-supplier=Conrad; ComponentLink4Description: https://datasheet.ciiva.com/41460/001188042-da-01-en-ic-hdmi-esd-pr-tpd12s016pwr-tssop-24-tid-41460279.pdf?src-supplier=Conrad; ComponentLink5URL: https://datasheet.ciiva.com/3149/tpd12s016-3149560.pdf?src-supplier=Avnet; ComponentLink5Description: https://datasheet.ciiva.com/3149/tpd12s016-3149560.pdf?src-supplier=Avnet
footprint 24-TSSOP
pins: 1 CEC_A, 2 SCL_A, 3 SDA_A, 4 HPD_A-, 5 LS_OE, 6 GND, 7 CEC_B, 8 SCL_B, 9 SDA_B, 10 HPD_B, 11 VCC5V, 12 CT_HPD, 13 5V_OUT, 14 GND, 15 CLK-, 16 CLK+, 17 D0-, 18 D0+, 19 GND, 20 D1-, 21 D1+, 22 D2-, 23 D2+, 24 VCCA

## TPL7407LADR
designator U?
IC PWR DRIVER N-CHAN 1:1 16SOIC; Manufacturer: Texas Instruments; Manufacturer Part Number: TPL7407LADR; Supplier: Mouser; Supplier Part Number: 595-TPL7407LADR; RoHS: Yes; Category: Integrated Circuits (ICs); Stock: 7225; Pricing: 1=0.66, 10=0.544, 50=0.544, 100=0.407, 1000=0.252, 10000=0.197 (USD); ComponentLink1URL: http://www.ti.com/lit/ds/symlink/tpl7407la.pdf?src-supplier=Digi-Key; ComponentLink1Description: http://www.ti.com/lit/ds/symlink/tpl7407la.pdf?src-supplier=Digi-Key; ComponentLink2URL: http://www.ti.com/general/docs/suppproductinfo.tsp?distId=10&amp;gotoUrl=http%3A%2F%2Fwww.ti.com%2Flit%2Fgpn%2Ftpl7407la&src-supplier=Digi-Key; ComponentLink2Description: http://www.ti.com/general/docs/suppproductinfo.tsp?distId=10&amp;gotoUrl=http%3A%2F%2Fwww.ti.com%2Flit%2Fgpn%2Ftpl7407la&src-supplier=Digi-Key
footprint 16-SOIC
pins: 1 IN1, 2 IN2, 3 IN3, 4 IN4, 5 IN5, 6 IN6, 7 IN7, 8 GND, 9 COM, 10 OUT7, 11 OUT6, 12 OUT5, 13 OUT4, 14 OUT3, 15 OUT2, 16 OUT1

## TPS2024IDRQ1
designator U?
IC PWR SWITCH N-CHAN 1:1 8SOIC; Manufacturer: Texas Instruments; Manufacturer Part Number: TPS2024IDRQ1; Supplier: Mouser; Supplier Part Number: 595-TPS2024IDRQ1; RoHS: Yes; Category: Hot Swap Controllers; Stock: 4908; Pricing: 1=2.71, 10=2.44, 50=2.44, 100=1.96, 1000=1.34, 10000=1.13 (USD); ComponentLink1URL: https://datasheet.ciiva.com/3235/tps2022-q1-3235178.pdf?src-supplier=Avnet; ComponentLink1Description: https://datasheet.ciiva.com/3235/tps2022-q1-3235178.pdf?src-supplier=Avnet; ComponentLink2URL: https://datasheet.ciiva.com/1963/tps2022-q1-1963779.pdf?src-supplier=Digi-Key; ComponentLink2Description: https://datasheet.ciiva.com/1963/tps2022-q1-1963779.pdf?src-supplier=Digi-Key
footprint SOIC-8
pins: 1 GND, 2 IN1, 3 IN2, 4 ~{EN}, 5 ~{OC}, 6 OUT1, 7 OUT2, 8 OUT3

## TPS2041BQDBVRQ1
designator U?
IC PWR SWITCH N-CHAN 1:1 SOT23-5; Manufacturer: Texas Instruments; Manufacturer Part Number: TPS2041BQDBVRQ1; Supplier: Mouser; Supplier Part Number: 595-TPS2041BQDBVRQ1; RoHS: Yes; Category: Hot Swap Controllers; Stock: 8767; Pricing: 1=1.14, 10=0.979, 50=0.979, 100=0.752, 1000=0.52, 10000=0.435 (USD); ComponentLink1URL: https://datasheet.ciiva.com/1962/tps2051b-q1-1962665.pdf?src-supplier=Digi-Key; ComponentLink1Description: https://datasheet.ciiva.com/1962/tps2051b-q1-1962665.pdf?src-supplier=Digi-Key; ComponentLink2URL: https://datasheet.ciiva.com/15108/getdatasheetpartid-533870-15108595.pdf?src-supplier=Verical; ComponentLink2Description: https://datasheet.ciiva.com/15108/getdatasheetpartid-533870-15108595.pdf?src-supplier=Verical; ComponentLink3URL: https://datasheet.ciiva.com/3234/tps2042b-q1-3234787.pdf?src-supplier=Avnet; ComponentLink3Description: https://datasheet.ciiva.com/3234/tps2042b-q1-3234787.pdf?src-supplier=Avnet; ComponentLink4URL: https://datasheet.ciiva.com/1962/tps2041b-q1-1962673.pdf?src-supplier=Digi-Key; ComponentLink4Description: https://datasheet.ciiva.com/1962/tps2041b-q1-1962673.pdf?src-supplier=Digi-Key; ComponentLink5URL: https://datasheet.ciiva.com/1962/tps2041b-q1-1962674.pdf?src-supplier=Digi-Key; ComponentLink5Description: https://datasheet.ciiva.com/1962/tps2041b-q1-1962674.pdf?src-supplier=Digi-Key
footprint SOT-23-5
pins: 1 OUT, 2 GND, 3 ~{OC}, 4 ~{EN}, 5 IN

## TPS2066TDGNRQ1
designator U?
IC PWR SWITCH N-CHAN 1:2 8MSOP; Manufacturer: Texas Instruments; Manufacturer Part Number: TPS2066TDGNRQ1; Supplier: Mouser; Supplier Part Number: 595-TPS2066TDGNRQ1; RoHS: Yes; Category: Hot Swap Controllers; Stock: 11970; Pricing: 1=1.82, 10=1.66, 50=1.66, 100=1.33, 1000=0.963, 10000=0.825 (USD); ComponentLink1URL: https://datasheet.ciiva.com/4924/slvsb37-121164-4924528.pdf?src-supplier=Mouser; ComponentLink1Description: https://datasheet.ciiva.com/4924/slvsb37-121164-4924528.pdf?src-supplier=Mouser; ComponentLink2URL: https://datasheet.ciiva.com/1963/slvsb37-1963712.pdf?src-supplier=Digi-Key; ComponentLink2Description: https://datasheet.ciiva.com/1963/slvsb37-1963712.pdf?src-supplier=Digi-Key; ComponentLink3URL: https://datasheet.ciiva.com/14207/tps2066-q1-14207125.pdf?src-supplier=Avnet; ComponentLink3Description: https://datasheet.ciiva.com/14207/tps2066-q1-14207125.pdf?src-supplier=Avnet
footprint 8-HVSSOP
part A pins: 2 IN, 3 EN1, 7 OUT1, 8 ~{OC1}
part B pins: 1 GND, 4 EN2, 5 ~{OC2}, 6 OUT2, 9 GND

## TPS79933QDDCRQ1
designator U?
IC REG LINEAR 3.3V 200MA SOT23-5; Manufacturer: Texas Instruments; Manufacturer Part Number: TPS79933QDDCRQ1; Supplier: Mouser; Supplier Part Number: 595-TPS79933QDDCRQ1; RoHS: Yes; Category: Voltage Regulators - Linear; Stock: 7856; Pricing: 1=1.2, 10=1.02, 50=1.02, 100=0.78, 1000=0.544, 10000=0.463 (USD); ComponentLink1URL: https://datasheet.ciiva.com/2044/tps79933-q1-2044901.pdf?src-supplier=Digi-Key; ComponentLink1Description: https://datasheet.ciiva.com/2044/tps79933-q1-2044901.pdf?src-supplier=Digi-Key; ComponentLink2URL: https://datasheet.ciiva.com/14277/tps79933-q1-14277826.pdf?src-supplier=Avnet; ComponentLink2Description: https://datasheet.ciiva.com/14277/tps79933-q1-14277826.pdf?src-supplier=Avnet; Item Type: IC
footprint SOT-23-5
pins: 1 IN, 2 GND, 3 EN, 4 NR, 5 OUT